# Altium footprint library amirlib.PcbLib: 456 footprints (part 29 of 29)
Each footprint in its own frame and in the unit in brackets; x right, y up, seen from the top. Pads: shape width x height; smd on the part's side, far side on the other; paste and mask are expansions set on the pad; w line width, h text height; cw(c..) or ccw(c..) is an arc to the next point about the centre after c.
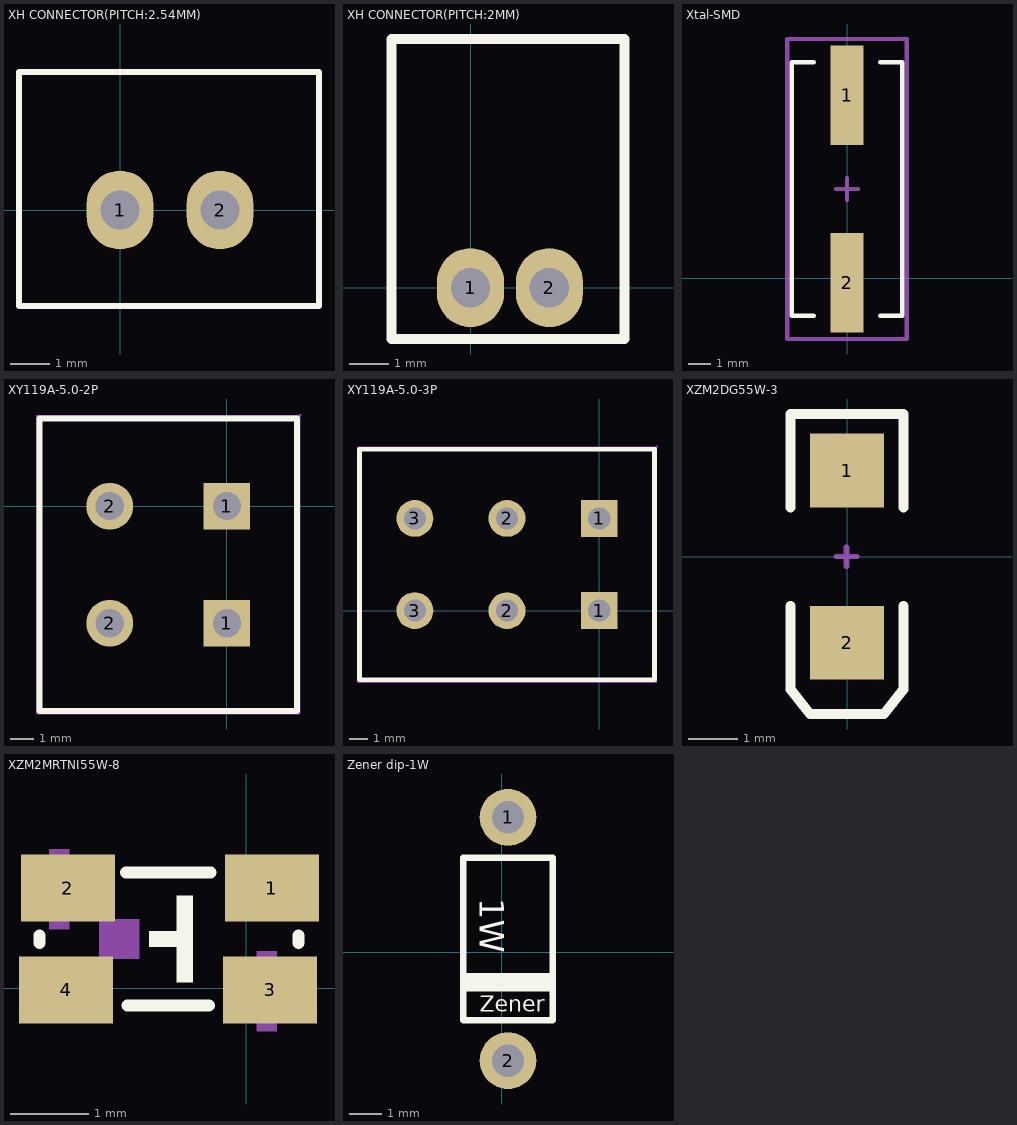
[diagram p28: the footprints below, top view; thin cyan lines are the x and y axes]

## XH CONNECTOR(PITCH:2.54MM) [mm]
pads (2):
  oval 1.7x2 hole 1: 1(0,0) 2(2.54,0)
Top Overlay:
  lines w0.15: -2.565,-2.438 5.055,-2.438 5.055,3.505 -2.565,3.505 -2.565,-2.438
3D body "C42391660_HANXIA_HX-XH2.54-2PZZ.step": height 7, standoff -3.4, extent -2.475,-2.342 4.965,3.408

## XH CONNECTOR(PITCH:2MM) [mm]
pads (2):
  oval 1.7x2 hole 1: 1(0,0) 2(2,0)
Top Overlay:
  lines w0.254: -2,-1.3 3.9,-1.3 3.9,6.3 -2,6.3 -2,-1.3
3D body "User Library-S2B.STEP": height 4.8, standoff -3.4, extent -2,-1.3 3.9,6.3

## Xtal-SMD [mm]
pads (2):
  rect 1.5x4.5 smd: 1(0,8.3) 2(0,-0.2)
Top Overlay:
  lines w0.2: -1.5,-1.7 -2.5,-1.7 -2.5,9.8 -1.5,9.8 ; 1.5,-1.7 2.5,-1.7 2.5,9.8 1.5,9.8
Mechanical 15:
  lines w0.2: -0.5,4.05 0.5,4.05 ; 0,3.55 0,4.55 ; -2.7,-2.75 -2.7,10.85 2.7,10.85 2.7,-2.75 -2.7,-2.75
3D body "User Library-HC49_SMD.STEP": height 5.18, standoff 0, extent -2.25,-2.041 2.25,10.259

## XY119A-5.0-2P [mm]
pads (4):
  rect 2x2 hole 1.2: 1(0,-5) 1(0,0)
  round 2 hole 1.2: 2(-5,-5) 2(-5,0)
Top Overlay:
  lines w0.254: -8,-8.75 3,-8.75 3,3.75 -8,3.75 -8,-8.75
Mechanical 15:
  region: 3.187,3.877 3.187,3.852 3.152,3.817 3.102,3.817 3.067,3.852 3.067,3.877 3.067,3.902 3.102,3.937 3.152,3.937 3.187,3.902
  region: 0.5,-5 0.5,-5.099 0.424,-5.283 0.283,-5.424 0.099,-5.5 -0.099,-5.5 -0.283,-5.424 -0.424,-5.283 -0.5,-5.099 -0.5,-5 -0.5,-4.901 -0.424,-4.717 -0.283,-4.576 -0.099,-4.5 0.099,-4.5 0.283,-4.576 0.424,-4.717 0.5,-4.901
  region: -4.5,-5 -4.5,-5.099 -4.576,-5.283 -4.717,-5.424 -4.901,-5.5 -5.099,-5.5 -5.283,-5.424 -5.424,-5.283 -5.5,-5.099 -5.5,-5 -5.5,-4.901 -5.424,-4.717 -5.283,-4.576 -5.099,-4.5 -4.901,-4.5 -4.717,-4.576 -4.576,-4.717 -4.5,-4.901
  region: -4.5,0 -4.5,-0.099 -4.576,-0.283 -4.717,-0.424 -4.901,-0.5 -5.099,-0.5 -5.283,-0.424 -5.424,-0.283 -5.5,-0.099 -5.5,0 -5.5,0.099 -5.424,0.283 -5.283,0.424 -5.099,0.5 -4.901,0.5 -4.717,0.424 -4.576,0.283 -4.5,0.099
  region: 0.5,0 0.5,-0.099 0.424,-0.283 0.283,-0.424 0.099,-0.5 -0.099,-0.5 -0.283,-0.424 -0.424,-0.283 -0.5,-0.099 -0.5,0 -0.5,0.099 -0.424,0.283 -0.283,0.424 -0.099,0.5 0.099,0.5 0.283,0.424 0.424,0.283 0.5,0.099
  lines w0.051: -8.127,-8.877 -8.127,3.877 3.127,3.877 3.127,-8.877 -8.127,-8.877

## XY119A-5.0-3P [mm]
pads (6):
  rect 2x2 hole 1.2: 1(0,0) 1(0,5)
  round 2 hole 1.2: 2(-5,0) 2(-5,5) 3(-10,0) 3(-10,5)
Top Overlay:
  lines w0.254: -13,-3.75 3,-3.75 3,8.75 -13,8.75 -13,-3.75
Mechanical 15:
  region: 3.187,8.877 3.187,8.852 3.152,8.817 3.102,8.817 3.067,8.852 3.067,8.877 3.067,8.902 3.102,8.937 3.152,8.937 3.187,8.902
  region: 0.5,0 0.5,-0.099 0.424,-0.283 0.283,-0.424 0.099,-0.5 -0.099,-0.5 -0.283,-0.424 -0.424,-0.283 -0.5,-0.099 -0.5,0 -0.5,0.099 -0.424,0.283 -0.283,0.424 -0.099,0.5 0.099,0.5 0.283,0.424 0.424,0.283 0.5,0.099
  region: -4.5,0 -4.5,-0.099 -4.576,-0.283 -4.717,-0.424 -4.901,-0.5 -5.099,-0.5 -5.283,-0.424 -5.424,-0.283 -5.5,-0.099 -5.5,0 -5.5,0.099 -5.424,0.283 -5.283,0.424 -5.099,0.5 -4.901,0.5 -4.717,0.424 -4.576,0.283 -4.5,0.099
  region: -4.5,5 -4.5,4.901 -4.576,4.717 -4.717,4.576 -4.901,4.5 -5.099,4.5 -5.283,4.576 -5.424,4.717 -5.5,4.901 -5.5,5 -5.5,5.099 -5.424,5.283 -5.283,5.424 -5.099,5.5 -4.901,5.5 -4.717,5.424 -4.576,5.283 -4.5,5.099
  region: 0.5,5 0.5,4.901 0.424,4.717 0.283,4.576 0.099,4.5 -0.099,4.5 -0.283,4.576 -0.424,4.717 -0.5,4.901 -0.5,5 -0.5,5.099 -0.424,5.283 -0.283,5.424 -0.099,5.5 0.099,5.5 0.283,5.424 0.424,5.283 0.5,5.099
  lines w0.051: -13.081,-3.877 3.127,-3.877 3.127,8.877 -13.081,8.877 -13.081,-3.877

## XZM2DG55W-3 [mm]
pads (2):
  rect 1.5x1.5 smd: 1(0,1.75) 2(0,-1.75)
Top Overlay:
  lines w0.2: -1.15,-1 -1.15,-2.7 -0.75,-3.2 0.75,-3.2 1.15,-2.7 1.15,-1 ; -1.15,1 -1.15,2.9 1.15,2.9 1.15,1
Mechanical 1:
  lines w0.1: -0.225,0 0.175,0 ; -0.2,0 0.2,0 ; -0.025,-0.2 -0.025,0.2 ; 0,-0.2 0,0.2
3D body "User Library-LED_KPTD-3216 Red.STEP": height 1.8, standoff 0, extent -0.8,-1.6 0.8,1.6

## XZM2MRTNI55W-8 [mm]
pads (4):
  rect 1.2x0.85 smd paste+0 mask+0.051: 1(0.329,1.275) 2(-2.271,1.275) 3(0.305,-0.025) 4(-2.295,-0.025)
Top Overlay:
  region: -0.683,1.175 -0.683,0.075 -0.883,0.075 -0.883,0.525 -1.233,0.525 -1.233,0.725 -0.883,0.725 -0.883,1.175
  lines w0.152: -2.633,0.575 -2.633,0.669 ; -1.533,1.475 -0.451,1.475 ; -1.515,-0.225 -1.483,-0.225 -0.475,-0.225 ; 0.667,0.575 0.667,0.669
Mechanical 15:
  region: -1.872,0.879 -1.364,0.879 -1.364,0.371 -1.872,0.371
  region: -2.253,1.768 -2.507,1.768 -2.507,0.752 -2.253,0.752
  region: -0.221,1.387 -0.221,1.133 0.795,1.133 0.795,1.387
  region: 0.136,-0.548 0.39,-0.548 0.39,0.468 0.136,0.468
  region: -2.845,0.087 -2.845,-0.167 -1.829,-0.167 -1.829,0.087
  region: -2.821,1.387 -2.821,1.133 -1.805,1.133 -1.805,1.387
  region: -0.245,0.087 -0.245,-0.167 0.771,-0.167 0.771,0.087

## Zener dip-1W [mil]
pads (2):
  round 70 hole 40: 1(7.87,166.14) 2(7.87,-133.86)
Top Overlay:
  region: -47.13,-25.86 -47.13,-48.86 62.87,-48.86 62.87,-25.86
  lines w7.87: -47.13,-83.86 62.87,-83.86 62.87,116.14 -47.13,116.14 -47.13,-83.86
  text "Zener" at -27.13,-73.86 h19.68
  text "1W" at -27.13,66.14 h30
3D body "Zener 1W.STEP": height 131.24, standoff -39.37, extent -44.24,-148.86 59.99,182.14